# Altium footprint library rus.PcbLib: 72 footprints (part 1 of 5)
Each footprint in its own frame and in the unit in brackets; x right, y up, seen from the top. Pads: shape width x height; smd on the part's side, far side on the other; paste and mask are expansions set on the pad; w line width, h text height; cw(c..) or ccw(c..) is an arc to the next point about the centre after c.
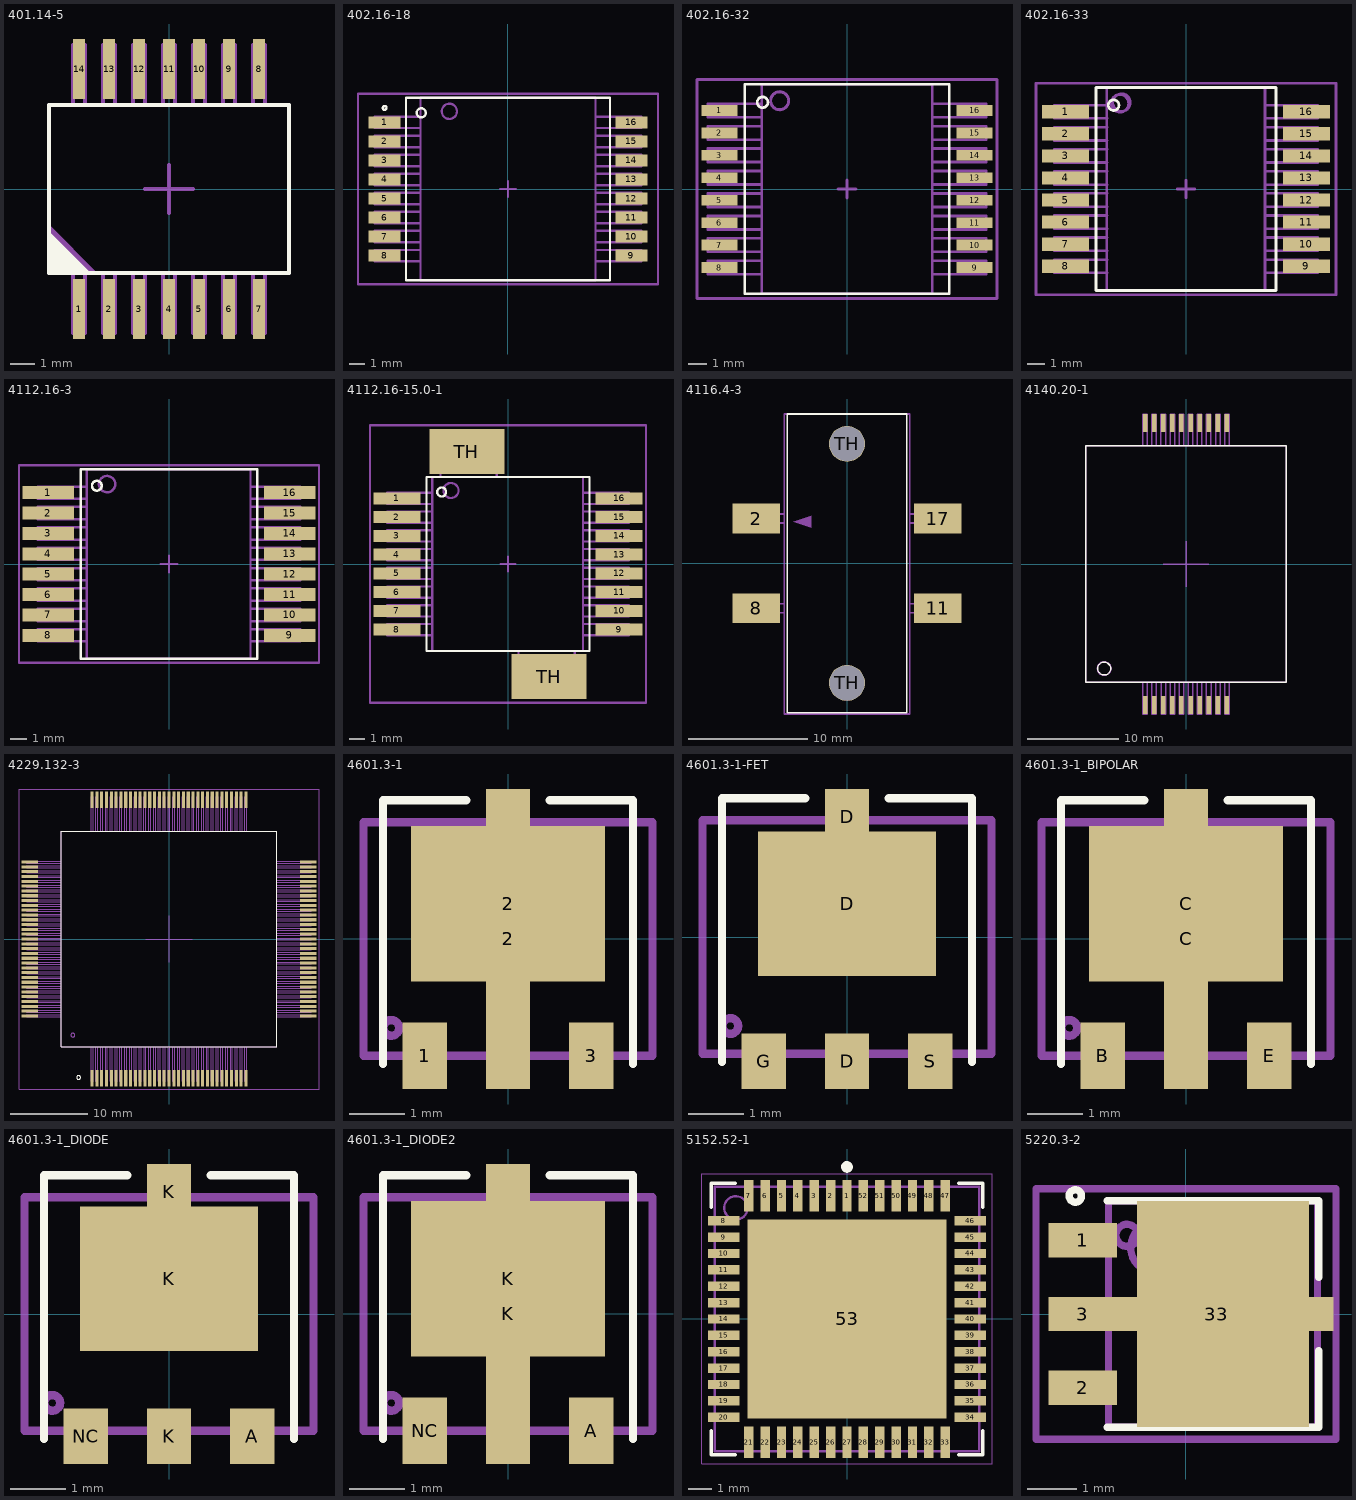
[diagram p0: the footprints below, top view; thin cyan lines are the x and y axes]

## 401.14-5 [mm]
height 1.85
pads (14):
  rect 0.5x2.5 smd: 1(-3.75,-5) 2(-2.5,-5) 3(-1.25,-5) 4(0,-5) 5(1.25,-5) 6(2.5,-5) 7(3.75,-5) 8(3.75,5) 9(2.5,5) 10(1.25,5) 11(0,5) 12(-1.25,5) 13(-2.5,5) 14(-3.75,5)
Top Overlay:
  region: -5,-1.75 -5,-3.5 -3.25,-3.5
  lines w0.15: -5,-3.5 5,-3.5 5,3.5 -5,3.5 -5,-3.5
Mechanical 15:
  lines w0.15: -1,0 1,0 ; 0,-1 0,1
Mechanical 29:
  region: -5,-3.5 -5,-1.5 -3,-3.5
  lines w0.15: -4,-3.5 -4,-6 -3.5,-6 -3.5,-5.5 -3.5,-3.5 ; -4,3.5 -4,5.5 -4,6 -3.5,6 -3.5,3.5 ; -2.75,-3.5 -2.75,-6 -2.25,-6 -2.25,-5.5 -2.25,-3.5 ; -2.75,3.5 -2.75,5.5 -2.75,6 -2.25,6 -2.25,3.5 ; -1.5,-3.5 -1.5,-6 -1,-6 -1,-5.5 -1,-3.5 ; -1.5,3.5 -1.5,5.5 -1.5,6 -1,6 -1,3.5 ; -0.25,-3.5 -0.25,-6 0.25,-6 0.25,-5.5 0.25,-3.5 ; -0.25,3.5 -0.25,5.5 -0.25,6 0.25,6 0.25,3.5 ; 1,-3.5 1,-6 1.5,-6 1.5,-5.5 1.5,-3.5 ; 1,3.5 1,5.5 1,6 1.5,6 1.5,3.5 ; 2.25,-3.5 2.25,-6 2.75,-6 2.75,-5.5 2.75,-3.5 ; 2.25,3.5 2.25,5.5 2.25,6 2.75,6 2.75,3.5 ; 3.5,-3.5 3.5,-6 4,-6 4,-5.5 4,-3.5 ; 3.5,3.5 3.5,5.5 3.5,6 4,6 4,3.5 ; -5,-3.5 5,-3.5 5,3.5 -5,3.5 -5,-3.5
  text ".Designator" at -3.6,-0.3 h1
3D body "401.14-5.STEP": height 3, standoff -0.03, extent -5,-6.35 5,6.35

## 402.16-18 [mm]
height 2.5
pads (16):
  rect 2.1x0.8 smd: 1(-8.1,4.375) 2(-8.1,3.125) 3(-8.1,1.875) 4(-8.1,0.625) 5(-8.1,-0.625) 6(-8.1,-1.875) 7(-8.1,-3.125) 8(-8.1,-4.375) 9(8.1,-4.375) 10(8.1,-3.125) 11(8.1,-1.875) 12(8.1,-0.625) 13(8.1,0.625) 14(8.1,1.875) 15(8.1,3.125) 16(8.1,4.375)
Top Overlay:
  circle w0.15: c-8.1,5.325 r0.125
  circle w0.15: c-5.7,5 r0.3
  lines w0.15: -6.7,-6 6.7,-6 6.7,6 -6.7,6 -6.7,-6
Mechanical 15:
  lines w0.15: -0.5,0 0.5,0 ; 0,-0.5 0,0.5 ; -9.85,-6.25 9.85,-6.25 9.85,6.25 -9.85,6.25 -9.85,-6.25
Mechanical 29:
  circle w0.15: c-3.85,5.1 r0.5
  lines w0.15: -5.75,-4.75 -8.75,-4.75 -8.75,-4 -5.75,-4 ; -5.75,-3.5 -8.75,-3.5 -8.75,-2.75 -5.75,-2.75 ; -5.75,-2.25 -8.75,-2.25 -8.75,-1.5 -5.75,-1.5 ; -5.75,-1 -8.75,-1 -8.75,-0.25 -5.75,-0.25 ; -5.75,0.25 -8.75,0.25 -8.75,1 -5.75,1 ; -5.75,1.5 -8.75,1.5 -8.75,2.25 -5.75,2.25 ; -5.75,2.75 -8.75,2.75 -8.75,3.5 -5.75,3.5 ; -5.75,4 -8.75,4 -8.75,4.75 -5.75,4.75 ; 5.75,-4.75 8.75,-4.75 8.75,-4 5.75,-4 ; 5.75,-3.5 8.75,-3.5 8.75,-2.75 5.75,-2.75 ; 5.75,-2.25 8.75,-2.25 8.75,-1.5 5.75,-1.5 ; 5.75,-1 8.75,-1 8.75,-0.25 5.75,-0.25 ; 5.75,0.25 8.75,0.25 8.75,1 5.75,1 ; 5.75,1.5 8.75,1.5 8.75,2.25 5.75,2.25 ; 5.75,2.75 8.75,2.75 8.75,3.5 5.75,3.5 ; 5.75,4 8.75,4 8.75,4.75 5.75,4.75 ; -5.75,-6 5.75,-6 5.75,6 -5.75,6 -5.75,-6
  text ".Designator" at -3.2,-0.1 h1
3D body "402.16-18.step": height 2, standoff 0, extent -9.15,-6 9.15,6

## 402.16-32 [mm] "CFP, 16-Leads, Body 11,65x9,30mm (max), Pitch 1,25mm, IPC Medium Density"
height 2.7
pads (16):
  rect 2x0.6 smd: 1(-7.1,4.375) 2(-7.1,3.125) 3(-7.1,1.875) 4(-7.1,0.625) 5(-7.1,-0.625) 6(-7.1,-1.875) 7(-7.1,-3.125) 8(-7.1,-4.375) 9(7.1,-4.375) 10(7.1,-3.125) 11(7.1,-1.875) 12(7.1,-0.625) 13(7.1,0.625) 14(7.1,1.875) 15(7.1,3.125) 16(7.1,4.375)
Top Overlay:
  circle w0.15: c-4.7,4.825 r0.3
  lines w0.15: -5.7,-5.825 -5.7,5.825 5.7,5.825 5.7,-5.825 -5.7,-5.825
Mechanical 13:
  circle w0.15: c-3.75,4.925 r0.5
Mechanical 15:
  lines w0.15: -0.5,0 0.5,0 ; 0,-0.5 0,0.5 ; -8.35,-6.1 -8.35,6.1 8.35,6.1 8.35,-6.1 -8.35,-6.1
Mechanical 29:
  circle w0.15: c-3.75,4.9 r0.5
  lines w0.15: -4.75,-4.75 -7.75,-4.75 -7.75,-4 -4.75,-4 ; -4.75,-3.5 -7.75,-3.5 -7.75,-2.75 -4.75,-2.75 ; -4.75,-2.25 -7.75,-2.25 -7.75,-1.5 -4.75,-1.5 ; -4.75,-1 -7.75,-1 -7.75,-0.25 -4.75,-0.25 ; -4.75,0.25 -7.75,0.25 -7.75,1 -4.75,1 ; -4.75,1.5 -7.75,1.5 -7.75,2.25 -4.75,2.25 ; -4.75,2.75 -7.75,2.75 -7.75,3.5 -4.75,3.5 ; -4.75,4 -7.75,4 -7.75,4.75 -4.75,4.75 ; 4.75,-4.75 7.75,-4.75 7.75,-4 4.75,-4 ; 4.75,-3.5 7.75,-3.5 7.75,-2.75 4.75,-2.75 ; 4.75,-2.25 7.75,-2.25 7.75,-1.5 4.75,-1.5 ; 4.75,-1 7.75,-1 7.75,-0.25 4.75,-0.25 ; 4.75,0.25 7.75,0.25 7.75,1 4.75,1 ; 4.75,1.5 7.75,1.5 7.75,2.25 4.75,2.25 ; 4.75,2.75 7.75,2.75 7.75,3.5 4.75,3.5 ; 4.75,4 7.75,4 7.75,4.75 4.75,4.75 ; -4.75,-5.825 -4.75,5.825 4.75,5.825 4.75,-5.825 -4.75,-5.825
  text ".Designator" at -3.5,-0.4 h1
3D body "402.16-32.step": height 2.2, standoff 0, extent -7.65,-5.825 7.65,5.825

## 402.16-33 [mm] "CFP, 16-Leads, Body 11,50x9,30mm (max), Pitch 1,25mm, IPC Low Density"
height 2.45
pads (16):
  rect 2.65x0.75 smd: 1(-6.825,4.375) 2(-6.825,3.125) 3(-6.825,1.875) 4(-6.825,0.625) 5(-6.825,-0.625) 6(-6.825,-1.875) 7(-6.825,-3.125) 8(-6.825,-4.375) 9(6.825,-4.375) 10(6.825,-3.125) 11(6.825,-1.875) 12(6.825,-0.625) 13(6.825,0.625) 14(6.825,1.875) 15(6.825,3.125) 16(6.825,4.375)
Top Overlay:
  circle w0.15: c-4.1,4.75 r0.3
  lines w0.15: -5.1,-5.75 5.1,-5.75 5.1,5.75 -5.1,5.75 -5.1,-5.75
Mechanical 13:
  circle w0.15: c-3.75,4.85 r0.5
Mechanical 15:
  lines w0.15: -0.5,0 0.5,0 ; 0,-0.5 0,0.5 ; -8.5,-6 8.5,-6 8.5,6 -8.5,6 -8.5,-6
Mechanical 29:
  circle w0.15: c-3.65,4.9 r0.5
  lines w0.15: -4.475,-4.75 -7.475,-4.75 -7.475,-4 -4.475,-4 ; -4.475,-3.5 -7.475,-3.5 -7.475,-2.75 -4.475,-2.75 ; -4.475,-2.25 -7.475,-2.25 -7.475,-1.5 -4.475,-1.5 ; -4.475,-1 -7.475,-1 -7.475,-0.25 -4.475,-0.25 ; -4.475,0.25 -7.475,0.25 -7.475,1 -4.475,1 ; -4.475,1.5 -7.475,1.5 -7.475,2.25 -4.475,2.25 ; -4.475,2.75 -7.475,2.75 -7.475,3.5 -4.475,3.5 ; -4.475,4 -7.475,4 -7.475,4.75 -4.475,4.75 ; 4.475,-4.75 7.475,-4.75 7.475,-4 4.475,-4 ; 4.475,-3.5 7.475,-3.5 7.475,-2.75 4.475,-2.75 ; 4.475,-2.25 7.475,-2.25 7.475,-1.5 4.475,-1.5 ; 4.475,0.25 7.475,0.25 7.475,1 4.475,1 ; 4.475,1.5 7.475,1.5 7.475,2.25 4.475,2.25 ; 4.475,2.75 7.475,2.75 7.475,3.5 4.475,3.5 ; 4.475,4 7.475,4 7.475,4.75 4.475,4.75 ; 7.475,-1 7.475,-0.25 ; 7.475,-1 4.475,-1 7.475,-1 ; 7.475,-1 7.475,-0.25 ; 7.475,-0.25 4.475,-0.25 7.475,-0.25 ; -4.5,-5.75 4.475,-5.75 4.475,5.75 -4.5,5.75 -4.5,-5.75
  text ".Designator" at -3.3,-0.4 h1
3D body "402.16-33.step": height 1.95, standoff 0, extent -7.5,-5.75 7.5,5.75

## 4112.16-3 [mm] "CFP, 16-Leads, Body 11,60x9,40mm (max), Pitch 1,25mm, IPC Medium Density"
height 3
pads (16):
  rect 3.15x0.8 smd: 1(-7.4,4.375) 2(-7.4,3.125) 3(-7.4,1.875) 4(-7.4,0.625) 5(-7.4,-0.625) 6(-7.4,-1.875) 7(-7.4,-3.125) 8(-7.4,-4.375) 9(7.4,-4.375) 10(7.4,-3.125) 11(7.4,-1.875) 12(7.4,-0.625) 13(7.4,0.625) 14(7.4,1.875) 15(7.4,3.125) 16(7.4,4.375)
Top Overlay:
  circle w0.15: c-4.425,4.8 r0.3
  lines w0.15: -5.425,-5.8 -5.425,5.8 5.425,5.8 5.425,-5.8 -5.425,-5.8
Mechanical 15:
  lines w0.15: -0.5,0 0.5,0 ; 0,-0.5 0,0.5 ; -9.2,-6.05 -9.2,6.05 9.2,6.05 9.2,-6.05 -9.2,-6.05
Mechanical 29:
  circle w0.15: c-3.8,4.9 r0.5
  lines w0.15: -5.05,-4.75 -8.05,-4.75 -8.05,-4 -5.05,-4 ; -5.05,-3.5 -8.05,-3.5 -8.05,-2.75 -5.05,-2.75 ; -5.05,-2.25 -8.05,-2.25 -8.05,-1.5 -5.05,-1.5 ; -5.05,-1 -8.05,-1 -8.05,-0.25 -5.05,-0.25 ; -5.05,0.25 -8.05,0.25 -8.05,1 -5.05,1 ; -5.05,1.5 -8.05,1.5 -8.05,2.25 -5.05,2.25 ; -5.05,2.75 -8.05,2.75 -8.05,3.5 -5.05,3.5 ; -5.05,4 -8.05,4 -8.05,4.75 -5.05,4.75 ; 5.05,-4.75 8.05,-4.75 8.05,-4 5.05,-4 ; 5.05,-3.5 8.05,-3.5 8.05,-2.75 5.05,-2.75 ; 5.05,-2.25 8.05,-2.25 8.05,-1.5 5.05,-1.5 ; 5.05,-1 8.05,-1 8.05,-0.25 5.05,-0.25 ; 5.05,0.25 8.05,0.25 8.05,1 5.05,1 ; 5.05,1.5 8.05,1.5 8.05,2.25 5.05,2.25 ; 5.05,2.75 8.05,2.75 8.05,3.5 5.05,3.5 ; 5.05,4 8.05,4 8.05,4.75 5.05,4.75 ; -5.05,-5.8 -5.05,5.8 5,5.8 5,-5.8 -5.05,-5.8
  text ".Designator" at -3.7,-0.3 h1
3D body "4112.16-3.step": height 2.5, standoff 0, extent -8.5,-5.8 8.5,5.8

## 4112.16-15.0-1 [mm]
height 5
pads (18):
  rect 3.15x0.8 smd: 1(-7.4,4.375) 2(-7.4,3.125) 3(-7.4,1.875) 4(-7.4,0.625) 5(-7.4,-0.625) 6(-7.4,-1.875) 7(-7.4,-3.125) 8(-7.4,-4.375) 9(7.4,-4.375) 10(7.4,-3.125) 11(7.4,-1.875) 12(7.4,-0.625) 13(7.4,0.625) 14(7.4,1.875) 15(7.4,3.125) 16(7.4,4.375)
  rect 5x3 smd: TH(-2.75,7.5) TH(2.75,-7.5)
Top Overlay:
  circle w0.15: c-4.425,4.8 r0.3
  lines w0.15: -5.425,-5.8 -5.425,5.8 5.425,5.8 5.425,-5.8 -5.425,-5.8
Mechanical 15:
  lines w0.15: -0.5,0 0.5,0 ; 0,-0.5 0,0.5 ; -9.2,-9.25 -9.2,9.25 9.2,9.25 9.2,-9.25 -9.2,-9.25
Mechanical 29:
  circle w0.15: c-3.8,4.9 r0.5
  lines w0.15: -5.05,-4.75 -8.05,-4.75 -8.05,-4 -5.05,-4 ; -5.05,-3.5 -8.05,-3.5 -8.05,-2.75 -5.05,-2.75 ; -5.05,-2.25 -8.05,-2.25 -8.05,-1.5 -5.05,-1.5 ; -5.05,-1 -8.05,-1 -8.05,-0.25 -5.05,-0.25 ; -5.05,0.25 -8.05,0.25 -8.05,1 -5.05,1 ; -5.05,1.5 -8.05,1.5 -8.05,2.25 -5.05,2.25 ; -5.05,2.75 -8.05,2.75 -8.05,3.5 -5.05,3.5 ; -5.05,4 -8.05,4 -8.05,4.75 -5.05,4.75 ; -4.5,5.8 -4.5,8.75 -0.75,8.75 -0.75,5.8 ; 0.7,-5.8 0.7,-8.75 4.45,-8.75 4.45,-5.8 ; 5.05,-4.75 8.05,-4.75 8.05,-4 5.05,-4 ; 5.05,-3.5 8.05,-3.5 8.05,-2.75 5.05,-2.75 ; 5.05,-2.25 8.05,-2.25 8.05,-1.5 5.05,-1.5 ; 5.05,-1 8.05,-1 8.05,-0.25 5.05,-0.25 ; 5.05,0.25 8.05,0.25 8.05,1 5.05,1 ; 5.05,1.5 8.05,1.5 8.05,2.25 5.05,2.25 ; 5.05,2.75 8.05,2.75 8.05,3.5 5.05,3.5 ; 5.05,4 8.05,4 8.05,4.75 5.05,4.75 ; -5.05,-5.8 -5.05,5.8 5,5.8 5,-5.8 -5.05,-5.8
  text ".Designator" at -3.4,-0.3 h1
3D body "4112.16-3.step": height 2.5, standoff 0, extent -8.5,-5.8 8.5,5.8

## 4116.4-3 [mm]
height 3.35
pads (6):
  rect 4x2.5 smd: 2(-7.6,3.75) 8(-7.6,-3.75) 11(7.6,-3.75) 17(7.6,3.75)
  round 3 hole 2.9: TH(0,-10) TH(0,10)
Top Overlay:
  lines w0.15: -5,-12.5 -5,12.5 5,12.5 5,-12.5 -5,-12.5
Mechanical 29:
  region: -4.5,3.5 -3,4 -3,3
  lines w0.15: -5.25,-4.125 -8.25,-4.125 -8.25,-3.375 -5.25,-3.375 ; -5.25,3.375 -8.25,3.375 -8.25,4.125 -5.25,4.125 ; 5.25,-4.125 8.25,-4.125 8.25,-3.375 5.25,-3.375 ; 5.25,3.375 8.25,3.375 8.25,4.125 5.25,4.125 ; -5.25,-12.6 5.25,-12.6 5.25,12.5 -5.25,12.5 -5.25,-12.6
  text ".Designator" at -3.1,-0.4 h1
3D body "4116.4-2.STEP": height 3.2, standoff 0, extent -7,-12.5 7,12.5

## 4140.20-1 [mm]
height 7.5
pads (20):
  rect 0.5x2 smd: 1(-4.5,-15.5) 2(-3.5,-15.5) 3(-2.5,-15.5) 4(-1.5,-15.5) 5(-0.5,-15.5) 6(0.5,-15.5) 7(1.5,-15.5) 8(2.5,-15.5) 9(3.5,-15.5) 10(4.5,-15.5) 11(4.5,15.5) 12(3.5,15.5) 13(2.5,15.5) 14(1.5,15.5) 15(0.5,15.5) 16(-0.5,15.5) 17(-1.5,15.5) 18(-2.5,15.5) 19(-3.5,15.5) 20(-4.5,15.5)
Top Overlay:
  circle w0.15: c-9,-11.5 r0.707
  lines w0.15: -11,-13 -11,13 11,13 11,-13 -11,-13
Mechanical 15:
  lines w0.15: -2.5,0 2.5,0 ; 0,-2.5 0,2.5
Mechanical 29:
  circle w0.15: c-9,-11.5 r0.75
  lines w0.15: -11,-13 11,-13 11,13 -11,13 -11,-13 ; -4.75,-16.5 -4.25,-16.5 -4.25,-13 -4.75,-13 -4.75,-16.5 ; -4.75,13 -4.75,16.5 -4.25,16.5 -4.25,13 -4.75,13 ; -3.75,-16.5 -3.75,-13 -3.25,-13 -3.25,-16.5 -3.75,-16.5 ; -3.75,13 -3.75,16.5 -3.25,16.5 -3.25,13 -3.75,13 ; -2.75,-16.5 -2.75,-13 -2.25,-13 -2.25,-16.5 -2.75,-16.5 ; -2.75,13 -2.75,16.5 -2.25,16.5 -2.25,13 -2.75,13 ; -1.75,-16.5 -1.75,-13 -1.25,-13 -1.25,-16.5 -1.75,-16.5 ; -1.75,13 -1.75,16.5 -1.25,16.5 -1.25,13 -1.75,13 ; -0.75,-16.5 -0.75,-13 -0.25,-13 -0.25,-16.5 -0.75,-16.5 ; -0.75,13 -0.75,16.5 -0.25,16.5 -0.25,13 -0.75,13 ; 0.25,-16.5 0.25,-13 0.75,-13 0.75,-16.5 0.25,-16.5 ; 0.25,13 0.25,16.5 0.75,16.5 0.75,13 0.25,13 ; 1.25,-16.5 1.25,-13 1.75,-13 1.75,-16.5 1.25,-16.5 ; 1.25,13 1.25,16.5 1.75,16.5 1.75,13 1.25,13 ; 2.25,-16.5 2.25,-13 2.75,-13 2.75,-16.5 2.25,-16.5 ; 2.25,13 2.25,16.5 2.75,16.5 2.75,13 2.25,13 ; 3.25,-16.5 3.25,-13 3.75,-13 3.75,-16.5 3.25,-16.5 ; 3.25,13 3.25,16.5 3.75,16.5 3.75,13 3.25,13 ; 4.25,-16.5 4.25,-13 4.75,-13 4.75,-16.5 4.25,-16.5 ; 4.25,13 4.75,13 4.75,16.5 4.25,16.5 4.25,13
  text ".Designator" at -4.1,-0.5 h1
3D body: height 0.5, standoff 0, extent 4.25,12.25 4.75,15.5
3D body: height 0.5, standoff 0, extent 3.25,12.25 3.75,15.5
3D body: height 0.5, standoff 0, extent 2.25,12.25 2.75,15.5
3D body: height 0.5, standoff 0, extent 1.25,12.25 1.75,15.5
3D body: height 0.5, standoff 0, extent 0.25,12.25 0.75,15.5
3D body: height 0.5, standoff 0, extent -0.75,12.25 -0.25,15.5
3D body: height 0.5, standoff 0, extent -1.75,12.25 -1.25,15.5
3D body: height 0.5, standoff 0, extent -2.75,12.25 -2.25,15.5
3D body: height 0.5, standoff 0, extent -3.75,12.25 -3.25,15.5
3D body: height 0.5, standoff 0, extent -4.75,12.25 -4.25,15.5
3D body: height 0.5, standoff 0, extent 4.25,-15.5 4.75,-12.25
3D body: height 0.5, standoff 0, extent 3.25,-15.5 3.75,-12.25
3D body: height 0.5, standoff 0, extent 2.25,-15.5 2.75,-12.25
3D body: height 0.5, standoff 0, extent 1.25,-15.5 1.75,-12.25
3D body: height 0.5, standoff 0, extent 0.25,-15.5 0.75,-12.25
3D body: height 0.5, standoff 0, extent -0.75,-15.5 -0.25,-12.25
3D body: height 0.5, standoff 0, extent -1.75,-15.5 -1.25,-12.25
3D body: height 0.5, standoff 0, extent -2.75,-15.5 -2.25,-12.25
3D body: height 0.5, standoff 0, extent -3.75,-15.5 -3.25,-12.25
3D body: height 0.5, standoff 0, extent -4.75,-15.5 -4.25,-12.25
3D body: height 7.5, standoff 0.5, extent -11,-13 11,13

## 4229.132-3 [mm]
height 3.06
pads (132):
  rect 0.4x2.1 smd: 1(-10,-18.1) 2(-9.375,-18.1) 3(-8.75,-18.1) 4(-8.125,-18.1) 5(-7.5,-18.1) 6(-6.875,-18.1) 7(-6.25,-18.1) 8(-5.625,-18.1) 9(-5,-18.1) 10(-4.375,-18.1) 11(-3.75,-18.1) 12(-3.125,-18.1) 13(-2.5,-18.1) 14(-1.875,-18.1) 15(-1.25,-18.1) 16(-0.625,-18.1) 17(0,-18.1) 18(0.625,-18.1) 19(1.25,-18.1) 20(1.875,-18.1) 21(2.5,-18.1) 22(3.125,-18.1) 23(3.75,-18.1) 24(4.375,-18.1) 25(5,-18.1) 26(5.625,-18.1) 27(6.25,-18.1) 28(6.875,-18.1) 29(7.5,-18.1) 30(8.125,-18.1) 31(8.75,-18.1) 32(9.375,-18.1) 33(10,-18.1) 67(10,18.1) 68(9.375,18.1) 69(8.75,18.1) 70(8.125,18.1) 71(7.5,18.1) 72(6.875,18.1) 73(6.25,18.1) 74(5.625,18.1) 75(5,18.1) 76(4.375,18.1) 77(3.75,18.1) 78(3.125,18.1) 79(2.5,18.1) 80(1.875,18.1) 81(1.25,18.1) 82(0.625,18.1) 83(0,18.1) 84(-0.625,18.1) 85(-1.25,18.1) 86(-1.875,18.1) 87(-2.5,18.1) 88(-3.125,18.1) 89(-3.75,18.1) 90(-4.375,18.1) 91(-5,18.1) 92(-5.625,18.1) 93(-6.25,18.1) 94(-6.875,18.1) 95(-7.5,18.1) 96(-8.125,18.1) 97(-8.75,18.1) 98(-9.375,18.1) 99(-10,18.1)
  rect 2.1x0.4 smd: 34(18.1,-10) 35(18.1,-9.375) 36(18.1,-8.75) 37(18.1,-8.125) 38(18.1,-7.5) 39(18.1,-6.875) 40(18.1,-6.25) 41(18.1,-5.625) 42(18.1,-5) 43(18.1,-4.375) 44(18.1,-3.75) 45(18.1,-3.125) 46(18.1,-2.5) 47(18.1,-1.875) 48(18.1,-1.25) 49(18.1,-0.625) 50(18.1,0) 51(18.1,0.625) 52(18.1,1.25) 53(18.1,1.875) 54(18.1,2.5) 55(18.1,3.125) 56(18.1,3.75) 57(18.1,4.375) 58(18.1,5) 59(18.1,5.625) 60(18.1,6.25) 61(18.1,6.875) 62(18.1,7.5) 63(18.1,8.125) 64(18.1,8.75) 65(18.1,9.375) 66(18.1,10) 100(-18.1,10) 101(-18.1,9.375) 102(-18.1,8.75) 103(-18.1,8.125) 104(-18.1,7.5) 105(-18.1,6.875) 106(-18.1,6.25) 107(-18.1,5.625) 108(-18.1,5) 109(-18.1,4.375) 110(-18.1,3.75) 111(-18.1,3.125) 112(-18.1,2.5) 113(-18.1,1.875) 114(-18.1,1.25) 115(-18.1,0.625) 116(-18.1,0) 117(-18.1,-0.625) 118(-18.1,-1.25) 119(-18.1,-1.875) 120(-18.1,-2.5) 121(-18.1,-3.125) 122(-18.1,-3.75) 123(-18.1,-4.375) 124(-18.1,-5) 125(-18.1,-5.625) 126(-18.1,-6.25) 127(-18.1,-6.875) 128(-18.1,-7.5) 129(-18.1,-8.125) 130(-18.1,-8.75) 131(-18.1,-9.375) 132(-18.1,-10)
Top Overlay:
  circle w0.15: c-11.75,-18 r0.25
  lines w0.15: -14,-14 14,-14 14,14 -14,14 -14,-14
Mechanical 15:
  lines w0.15: -3,0 3,0 ; 0,-3 0,3 ; -19.5,-19.5 -19.5,19.5 19.5,19.5 19.5,-19.5 -19.5,-19.5
Mechanical 29:
  drawing of 401 lines, arcs and shapes, not listed
  text ".Designator" at -1.8,-0.5 h1
3D body "4229.132-3.STEP": height 3.91, standoff 0, extent -17.5,-17.5 17.5,17.5

## 4601.3-1 [mm] "4601.3-1 (КТ-99-1)"
height 1.7
pads (4):
  rect 0.8x1.2 smd: 1(-1.5,-2.1) 3(1.5,-2.1)
  rect 0.8x5.4 smd: 2(0,0)
  rect 3.5x2.8 smd: 2(0,0.635)
Top Overlay:
  lines w0.15: -2.25,-2.25 -2.25,2.5 -0.75,2.5 ; 0.75,2.5 2.25,2.5 2.25,-2.25
Mechanical 29:
  circle w0.15: c-2.1,-1.6 r0.141
  lines w0.15: -2.6,-2.1 -2.6,2.1 2.6,2.1 2.6,-2.1 -2.6,-2.1
  text ".Designator" at -2.1,-0.4 h1
3D body "4601.3-1.STEP": height 1.74, standoff 0, extent -2.3,-2.6 2.3,2.6

## 4601.3-1-FET [mm] "4601.3-1 (КТ-99-1) для полевых транзисторов"
height 1.7
pads (5):
  rect 0.8x1 smd: D(0,-2.235) D(0,2.165) G(-1.5,-2.235) S(1.5,-2.235)
  rect 3.2x2.6 smd: D(0,0.6)
Top Overlay:
  lines w0.15: -2.25,-2.25 -2.25,2.5 -0.75,2.5 ; 0.75,2.5 2.25,2.5 2.25,-2.25
Mechanical 29:
  circle w0.15: c-2.1,-1.6 r0.141
  lines w0.15: -2.6,-2.1 -2.6,2.1 2.6,2.1 2.6,-2.1 -2.6,-2.1
  text ".Designator" at -2.2,-0.3 h1
3D body "4601.3-1.STEP": height 1.74, standoff 0, extent -2.3,-2.6 2.3,2.6

## 4601.3-1_BIPOLAR [mm] "4601.3-1 (КТ-99-1) для биполярных транзисторов"
height 1.7
pads (4):
  rect 0.8x1.2 smd: B(-1.5,-2.1) E(1.5,-2.1)
  rect 0.8x5.4 smd: C(0,0)
  rect 3.5x2.8 smd: C(0,0.635)
Top Overlay:
  lines w0.15: -2.25,-2.25 -2.25,2.5 -0.75,2.5 ; 0.75,2.5 2.25,2.5 2.25,-2.25
Mechanical 29:
  circle w0.15: c-2.1,-1.6 r0.141
  lines w0.15: -2.6,-2.1 -2.6,2.1 2.6,2.1 2.6,-2.1 -2.6,-2.1
  text ".Designator" at -2.2,-0.2 h1
3D body "4601.3-1.STEP": height 1.74, standoff 0, extent -2.3,-2.6 2.3,2.6

## 4601.3-1_DIODE [mm] "4601.3-1 (КТ-99-1) для диодов"
height 1.7
pads (5):
  rect 0.8x1 smd: A(1.5,-2.2) K(0,-2.2) K(0,2.2) NC(-1.5,-2.2)
  rect 3.2x2.6 smd: K(0,0.635)
Top Overlay:
  lines w0.15: -2.25,-2.25 -2.25,2.5 -0.75,2.5 ; 0.75,2.5 2.25,2.5 2.25,-2.25
Mechanical 29:
  circle w0.15: c-2.1,-1.6 r0.141
  lines w0.15: -2.6,-2.1 2.6,-2.1 2.6,2.1 -2.6,2.1 -2.6,-2.1
  text ".Designator" at -2.3,-0.4 h1
3D body "4601.3-1.STEP": height 1.74, standoff 0, extent -2.3,-2.6 2.3,2.6

## 4601.3-1_DIODE2 [mm] "4601.3-1 (КТ-99-1) для диодов"
height 1.7
pads (4):
  rect 0.8x1.2 smd: A(1.5,-2.1) NC(-1.5,-2.1)
  rect 0.8x5.4 smd: K(0,0)
  rect 3.5x2.8 smd: K(0,0.635)
Top Overlay:
  lines w0.15: -2.25,-2.25 -2.25,2.5 -0.75,2.5 ; 0.75,2.5 2.25,2.5 2.25,-2.25
Mechanical 29:
  circle w0.15: c-2.1,-1.6 r0.141
  lines w0.15: -2.6,-2.1 2.6,-2.1 2.6,2.1 -2.6,2.1 -2.6,-2.1
  text ".Designator" at -2.4,-0.3 h1
3D body "4601.3-1.STEP": height 1.74, standoff 0, extent -2.3,-2.6 2.3,2.6

## 5152.52-1 [mm] "QFN, 52-Leads, Body 11,20x11,20mm, Pitch 0,70mm, Thermal Pad 8,50x8,50mm, IPC Medium Density"
height 2.06
pads (53):
  rect 0.4x1.35 smd: 1(0,5.275) 2(-0.7,5.275) 3(-1.4,5.275) 4(-2.1,5.275) 5(-2.8,5.275) 6(-3.5,5.275) 7(-4.2,5.275) 21(-4.2,-5.275) 22(-3.5,-5.275) 23(-2.8,-5.275) 24(-2.1,-5.275) 25(-1.4,-5.275) 26(-0.7,-5.275) 27(0,-5.275) 28(0.7,-5.275) 29(1.4,-5.275) 30(2.1,-5.275) 31(2.8,-5.275) 32(3.5,-5.275) 33(4.2,-5.275) 47(4.2,5.275) 48(3.5,5.275) 49(2.8,5.275) 50(2.1,5.275) 51(1.4,5.275) 52(0.7,5.275)
  rect 1.35x0.4 smd: 8(-5.275,4.2) 9(-5.275,3.5) 10(-5.275,2.8) 11(-5.275,2.1) 12(-5.275,1.4) 13(-5.275,0.7) 14(-5.275,0) 15(-5.275,-0.7) 16(-5.275,-1.4) 17(-5.275,-2.1) 18(-5.275,-2.8) 19(-5.275,-3.5) 20(-5.275,-4.2) 34(5.275,-4.2) 35(5.275,-3.5) 36(5.275,-2.8) 37(5.275,-2.1) 38(5.275,-1.4) 39(5.275,-0.7) 40(5.275,0) 41(5.275,0.7) 42(5.275,1.4) 43(5.275,2.1) 44(5.275,2.8) 45(5.275,3.5) 46(5.275,4.2)
  rect 8.5x8.5 smd: 53(0,0)
Top Overlay:
  circle w0.25: c0,6.5 r0.125
  lines w0.15: -5.8,-4.775 -5.8,-5.8 -4.775,-5.8 ; -5.8,4.775 -5.8,5.8 -4.775,5.8 ; 4.775,-5.8 5.8,-5.8 5.8,-4.775 ; 4.775,5.8 5.8,5.8 5.8,4.775
Mechanical 13:
  circle w0.1: c-4.75,4.75 r0.5
  lines w0.1: -5.65,-5.65 -5.65,5.65 5.65,5.65 5.65,-5.65 -5.65,-5.65
Mechanical 15:
  lines w0.05: -6.2,-6.2 -6.2,6.2 6.2,6.2 6.2,-6.2 -6.2,-6.2
  lines w0.1: -0.5,0 0.5,0 ; 0,-0.5 0,0.5
3D body "5152.52-1.step": height 2.06, standoff 0, extent -5.651,-5.651 5.651,5.651

## 5220.3-2 [mm] "SOT89, 3-Leads, Body 4,60x4,25mm, Pitch 1,50mm, Lead Span 4,8mm, IPC Medium Density"
height 1.6
pads (5):
  rect 1.4x0.7 smd: 1(-2.1,1.5) 2(-2.1,-1.5) 3(-2.1,0)
  rect 5x0.7 smd: 3(0.5,0)
  rect 3.5x4.6 smd: 3(0.75,0)
Top Overlay:
  circle w0.15: c-2.25,2.4 r0.125
  lines w0.15: -1.6,-2.3 2.7,-2.3 2.7,-0.75 ; -1.6,2.3 2.7,2.3 2.7,0.75
Mechanical 13:
  circle w0.15: c-0.625,1.35 r0.5
Mechanical 15:
  lines w0.15: 0.05,0 1.05,0 ; 0.55,-0.5 0.55,0.5 ; -3.05,-2.55 3.05,-2.55 3.05,2.55 -3.05,2.55 -3.05,-2.55
Mechanical 29:
  circle w0.15: c-1.2,1.6 r0.224
  lines w0.15: -1.575,-2.3 2.675,-2.3 2.675,2.3 -1.575,2.3 -1.575,-2.3
  text ".Designator" at -1.3,-0.4 h1
3D body "5220.3-2-IOG.step": height 1.6, standoff 0, extent -2.75,-2.3 2.85,2.3